# Altium footprint library Mechanical.PcbLib: 40 footprints (part 1 of 3)
Each footprint in its own frame and in the unit in brackets; x right, y up, seen from the top. Pads: shape width x height; smd on the part's side, far side on the other; paste and mask are expansions set on the pad; w line width, h text height; cw(c..) or ccw(c..) is an arc to the next point about the centre after c.
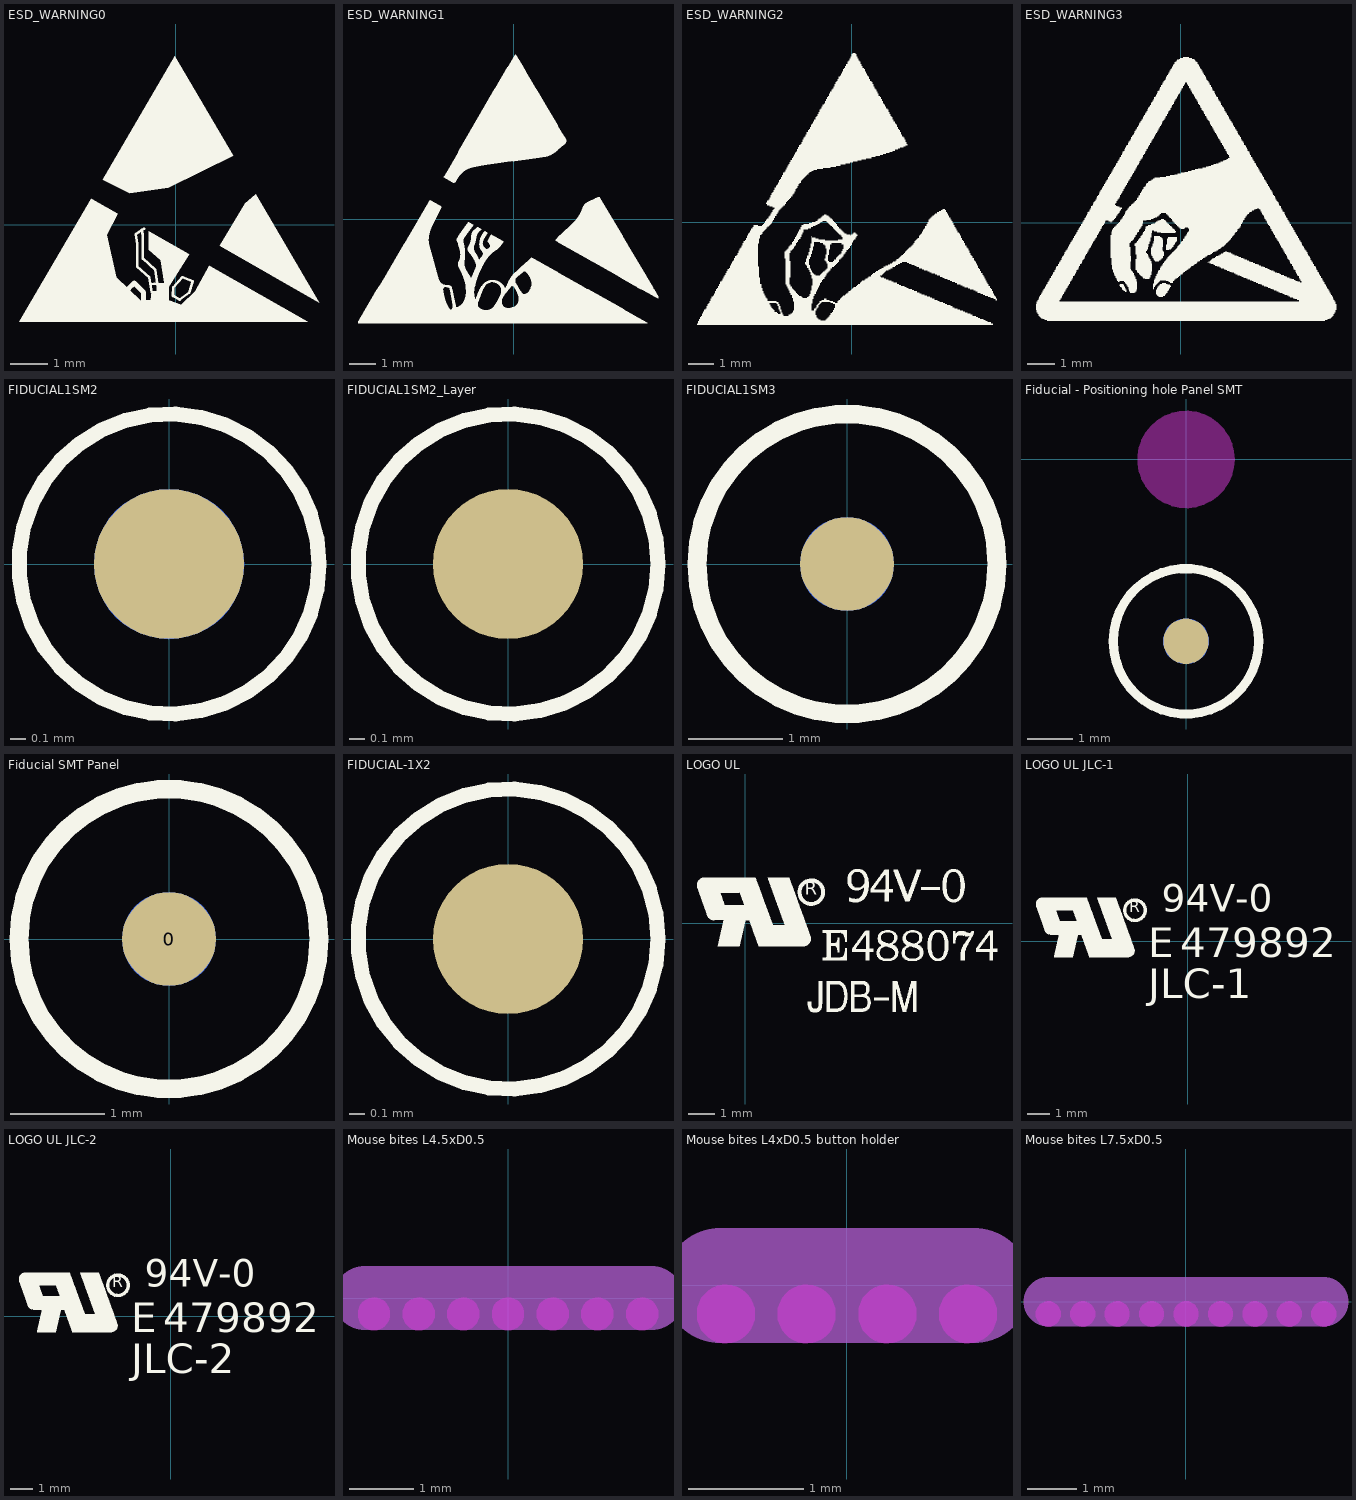
[diagram p0: the footprints below, top view; thin cyan lines are the x and y axes]

## ESD_WARNING0 [mm] "Electrostatic Discharge Warning, 8x7mm"
Top Overlay:
  region: -0.025,4.483 -1.936,1.203 -1.214,0.842 -0.196,0.984 1.527,1.834 -0.023,4.482
  region: 1.168,-0.564 3.812,-2.07 2.125,0.815 1.849,0.568 1.173,-0.552
  region: -2.242,0.693 -1.543,0.298 -1.83,-0.26 -1.583,-1.393 -0.932,-2.021 -0.658,-1.996 -0.638,-1.797 -0.5,-1.784 -0.489,-1.56 -0.304,-1.542 -0.397,-0.95 -0.717,-0.666 -0.717,-0.173 0.363,-0.787 -0.18,-1.647 -0.18,-2.003 0.146,-2.133 0.523,-1.772 0.894,-1.089 3.517,-2.582 -4.164,-2.582 -2.24,0.694
  lines w0.071: -0.893,-0.136 -0.871,-0.299 -0.871,-0.902 -0.542,-1.196 -0.489,-1.56 ; -0.843,-0.102 -1.058,-0.251 -1.024,-0.509 -1.024,-1.114 -0.697,-1.405 -0.638,-1.797 -0.457,-1.781 -0.489,-1.56 ; -0.672,-1.578 -0.489,-1.56 ; -0.068,-1.893 0.112,-1.989 0.361,-1.802 0.452,-1.501 0.181,-1.393 -0.061,-1.661 -0.068,-1.893
  lines w0.13: -1.257,-1.707 -1.1,-1.55 -0.85,-1.8 -0.85,-2

## ESD_WARNING1 [mm] "Electrostatic Discharge Warning, 10.3X11.6mm"
Top Overlay:
  drawing of 3 lines, arcs and shapes, not listed

## ESD_WARNING2 [mm] "Electrostatic Discharge Warning, 10.3X11.6mm"
Top Overlay:
  drawing of 1 lines, arcs and shapes, not listed

## ESD_WARNING3 [mm] "Electrostatic Discharge Warning, 9.6X11.1mm"
Top Overlay:
  drawing of 6 lines, arcs and shapes, not listed

## FIDUCIAL1SM2 [mm] "FIDUCIAL 1mm Pad, 2mm SolderMask"
pads (2):
  round 1 smd mask+0.5: ""(0,0)
  round 1 smd far side mask+0.5: ""(0,0)
Top Overlay:
  circle w0.1: c0,0 r1

## FIDUCIAL1SM2_Layer [mm] "FIDUCIAL 1mm Pad, 2mm SolderMask"
pads (1):
  round 1 smd mask+0.5: ""(0,0)
Top Overlay:
  circle w0.1: c0,0 r1

## FIDUCIAL1SM3 [mm] "FIDUCIAL 1mm Pad, 3mm SolderMask"
pads (2):
  round 1 smd paste-1 mask+1: ""(0,0)
  round 1 smd far side paste-1.016 mask+1: ""(0,0)
Top Overlay:
  circle w0.2: c0,0 r1.6

## Fiducial - Positioning hole Panel SMT [mm]
pads (2):
  round 1 smd mask+1: ""(0,-4)
  round 1 smd far side mask+1: ""(0,-4)
Top Overlay:
  circle w0.2: c0,-4 r1.6
Keep-Out Layer:
  board cut-out: 0,-1 -0.098,-1 -0.292,-0.962 -0.474,-0.886 -0.637,-0.777 -0.777,-0.637 -0.886,-0.474 -0.962,-0.292 -1,-0.098 -1,0 -1,0.098 -0.962,0.292 -0.886,0.474 -0.777,0.637 -0.637,0.777 -0.474,0.886 -0.292,0.962 -0.098,1 0,1 0.098,1 0.292,0.962 0.474,0.886 0.637,0.777 0.777,0.637 0.886,0.474 0.962,0.292 1,0.098 1,0 1,-0.098 0.962,-0.292 0.886,-0.474 0.777,-0.637 0.637,-0.777 0.474,-0.886 0.292,-0.962 0.098,-1
Keep-Out Layer:
  circle w0.15: c0,0 r1

## Fiducial SMT Panel [mm]
pads (2):
  round 1 smd far side mask+1: 0(0,0)
  round 1 smd mask+1: ""(0,0)
Top Overlay:
  circle w0.2: c0,0 r1.6

## FIDUCIAL-1X2 [mm] "FIDUCIAL 1mm Pad, 2mm SolderMask. By SMT"
pads (1):
  round 1 smd mask+0.5: ""(0,0)
Top Overlay:
  circle w0.1: c0,0 r1

## LOGO UL [mm]
height 2.54
Top Overlay:
  drawing of 19 lines, arcs and shapes, not listed
  text "R" at 2.264,0.908 h0.85

## LOGO UL JLC-1 [mm] "Usable for Multilayer"
height 2.54
Top Overlay:
  drawing of 2 lines, arcs and shapes, not listed
  text "E" at -1.734,-0.705 h1.3
  text "JLC-1" at -1.734,-2.505 h1.3
  text "479892" at -0.334,-0.705 h1.3
  text "94V-0" at -1.134,1.295 h1.2
  text "R" at -2.554,1.089 h0.85

## LOGO UL JLC-2 [mm] "Usable for Single/Double layer"
height 2.54
Top Overlay:
  drawing of 2 lines, arcs and shapes, not listed
  text "E" at -1.734,-0.705 h1.3
  text "JLC-2" at -1.734,-2.505 h1.3
  text "479892" at -0.334,-0.705 h1.3
  text "94V-0" at -1.134,1.295 h1.2
  text "R" at -2.554,1.089 h0.85

## Mouse bites L4.5xD0.5 [mm]
Keep-Out Layer:
  board cut-out: 2.1,0 2.15,0 2.242,-0.038 2.312,-0.108 2.35,-0.2 2.35,-0.25 2.35,-0.3 2.312,-0.392 2.242,-0.462 2.15,-0.5 2.1,-0.5 2.05,-0.5 1.958,-0.462 1.888,-0.392 1.85,-0.3 1.85,-0.25 1.85,-0.2 1.888,-0.108 1.958,-0.038 2.05,0
  board cut-out: 1.4,0 1.45,0 1.542,-0.038 1.612,-0.108 1.65,-0.2 1.65,-0.25 1.65,-0.3 1.612,-0.392 1.542,-0.462 1.45,-0.5 1.4,-0.5 1.35,-0.5 1.258,-0.462 1.188,-0.392 1.15,-0.3 1.15,-0.25 1.15,-0.2 1.188,-0.108 1.258,-0.038 1.35,0
  board cut-out: -1.4,0 -1.35,0 -1.258,-0.038 -1.188,-0.108 -1.15,-0.2 -1.15,-0.25 -1.15,-0.3 -1.188,-0.392 -1.258,-0.462 -1.35,-0.5 -1.4,-0.5 -1.45,-0.5 -1.542,-0.462 -1.612,-0.392 -1.65,-0.3 -1.65,-0.25 -1.65,-0.2 -1.612,-0.108 -1.542,-0.038 -1.45,0
  board cut-out: -2.1,0 -2.05,0 -1.958,-0.038 -1.888,-0.108 -1.85,-0.2 -1.85,-0.25 -1.85,-0.3 -1.888,-0.392 -1.958,-0.462 -2.05,-0.5 -2.1,-0.5 -2.15,-0.5 -2.242,-0.462 -2.312,-0.392 -2.35,-0.3 -2.35,-0.25 -2.35,-0.2 -2.312,-0.108 -2.242,-0.038 -2.15,0
  board cut-out: -0.7,0 -0.65,0 -0.558,-0.038 -0.488,-0.108 -0.45,-0.2 -0.45,-0.25 -0.45,-0.3 -0.488,-0.392 -0.558,-0.462 -0.65,-0.5 -0.7,-0.5 -0.75,-0.5 -0.842,-0.462 -0.912,-0.392 -0.95,-0.3 -0.95,-0.25 -0.95,-0.2 -0.912,-0.108 -0.842,-0.038 -0.75,0
  board cut-out: 0.7,0 0.75,0 0.842,-0.038 0.912,-0.108 0.95,-0.2 0.95,-0.25 0.95,-0.3 0.912,-0.392 0.842,-0.462 0.75,-0.5 0.7,-0.5 0.65,-0.5 0.558,-0.462 0.488,-0.392 0.45,-0.3 0.45,-0.25 0.45,-0.2 0.488,-0.108 0.558,-0.038 0.65,0
  board cut-out: 0,0 0.05,0 0.142,-0.038 0.212,-0.108 0.25,-0.2 0.25,-0.25 0.25,-0.3 0.212,-0.392 0.142,-0.462 0.05,-0.5 0,-0.5 -0.05,-0.5 -0.142,-0.462 -0.212,-0.392 -0.25,-0.3 -0.25,-0.25 -0.25,-0.2 -0.212,-0.108 -0.142,-0.038 -0.05,0
Keep-Out Layer:
  circle w0.005: c2.1,-0.248 r0.25
  circle w0.005: c1.4,-0.248 r0.25
  circle w0.005: c0.7,-0.248 r0.25
  circle w0.005: c0,-0.248 r0.25
  circle w0.005: c-0.7,-0.248 r0.25
  circle w0.005: c-1.4,-0.248 r0.25
  circle w0.005: c-2.1,-0.248 r0.25
Mechanical 4:
  lines w1: -2.25,0 2.25,0

## Mouse bites L4xD0.5 button holder [mm]
Keep-Out Layer:
  board cut-out: 1.05,0.002 1.1,0.002 1.192,-0.036 1.262,-0.106 1.3,-0.198 1.3,-0.248 1.3,-0.297 1.262,-0.389 1.192,-0.459 1.1,-0.497 1.05,-0.497 1,-0.497 0.908,-0.459 0.838,-0.389 0.8,-0.297 0.8,-0.247 0.8,-0.198 0.838,-0.106 0.908,-0.036 1,0.002
  board cut-out: 0.35,0.002 0.4,0.002 0.492,-0.036 0.562,-0.106 0.6,-0.198 0.6,-0.248 0.6,-0.297 0.562,-0.389 0.492,-0.459 0.4,-0.497 0.35,-0.497 0.3,-0.497 0.208,-0.459 0.138,-0.389 0.1,-0.297 0.1,-0.247 0.1,-0.198 0.138,-0.106 0.208,-0.036 0.3,0.002
  board cut-out: -0.35,0.002 -0.3,0.002 -0.208,-0.036 -0.138,-0.106 -0.1,-0.198 -0.1,-0.248 -0.1,-0.297 -0.138,-0.389 -0.208,-0.459 -0.3,-0.497 -0.35,-0.497 -0.4,-0.497 -0.492,-0.459 -0.562,-0.389 -0.6,-0.297 -0.6,-0.247 -0.6,-0.198 -0.562,-0.106 -0.492,-0.036 -0.4,0.002
  board cut-out: -1.05,0.002 -1,0.002 -0.908,-0.036 -0.838,-0.106 -0.8,-0.198 -0.8,-0.248 -0.8,-0.297 -0.838,-0.389 -0.908,-0.459 -1,-0.497 -1.05,-0.497 -1.1,-0.497 -1.192,-0.459 -1.262,-0.389 -1.3,-0.297 -1.3,-0.247 -1.3,-0.198 -1.262,-0.106 -1.192,-0.036 -1.1,0.002
Keep-Out Layer:
  circle w0.005: c1.05,-0.248 r0.25
  circle w0.005: c0.35,-0.248 r0.25
  circle w0.005: c-0.35,-0.248 r0.25
  circle w0.005: c-1.05,-0.248 r0.25
Mechanical 4:
  lines w1: -1.1,0 1.1,0

## Mouse bites L7.5xD0.5 [mm]
Keep-Out Layer:
  drawing of 9 lines, arcs and shapes, not listed
Keep-Out Layer:
  circle w0.005: c2.8,-0.248 r0.25
  circle w0.005: c2.1,-0.248 r0.25
  circle w0.005: c1.4,-0.248 r0.25
  circle w0.005: c0.7,-0.248 r0.25
  circle w0.005: c0,-0.248 r0.25
  circle w0.005: c-0.7,-0.248 r0.25
  circle w0.005: c-1.4,-0.248 r0.25
  circle w0.005: c-2.1,-0.248 r0.25
  circle w0.005: c-2.8,-0.248 r0.25
Mechanical 4:
  lines w1: -2.8,0 2.8,0